# Altium footprint library FootPrintLib_11.PcbLib: 376 footprints (part 7 of 24)
Each footprint in its own frame and in the unit in brackets; x right, y up, seen from the top. Pads: shape width x height; smd on the part's side, far side on the other; paste and mask are expansions set on the pad; w line width, h text height; cw(c..) or ccw(c..) is an arc to the next point about the centre after c.
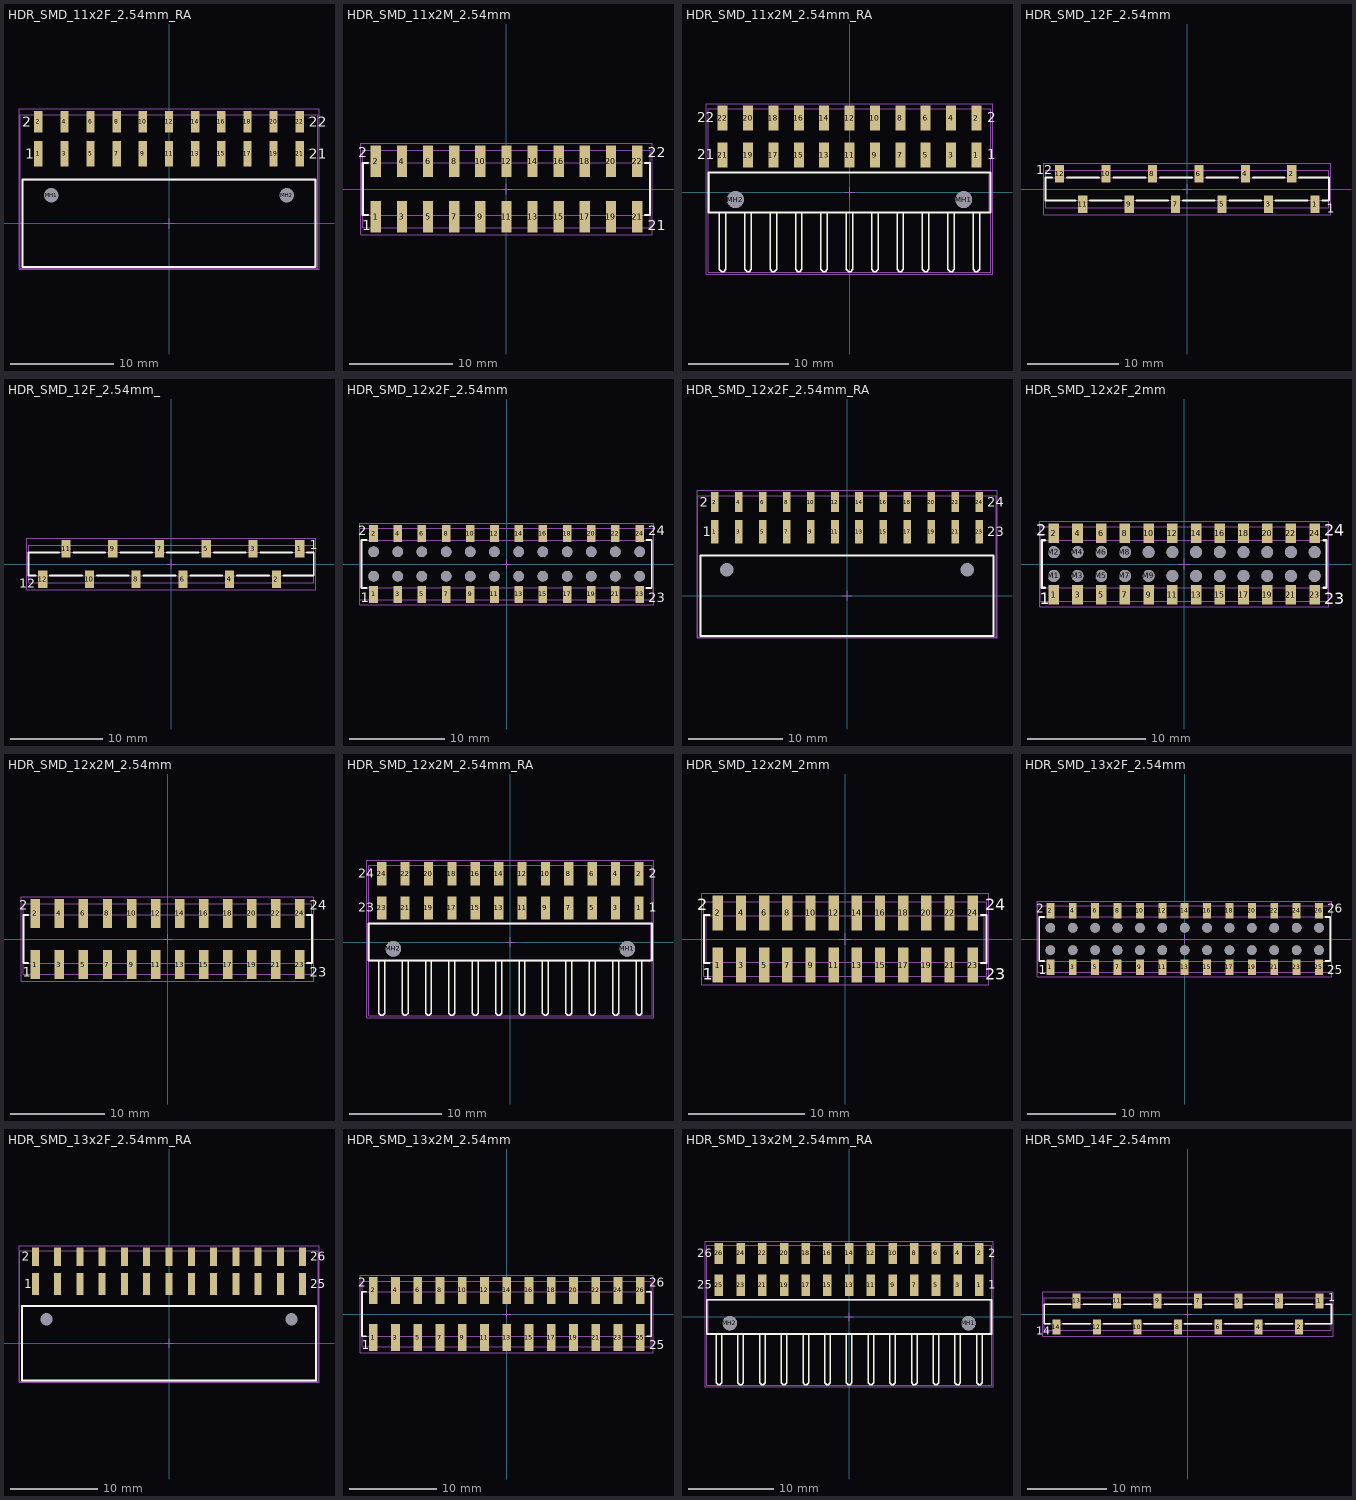
[diagram p6: the footprints below, top view; thin cyan lines are the x and y axes]

## HDR_SMD_11x2F_2.54mm_RA [mm] "Socket Header, Pitch 2.54 mm, SMT, Angled, dual row, 22p"
height 5.2
pads (24):
  rect 0.8x2.5 smd: 1(-12.7,6.76) 3(-10.16,6.76) 5(-7.62,6.76) 7(-5.08,6.76) 9(-2.54,6.76) 11(0,6.76) 13(2.54,6.76) 15(5.08,6.76) 17(7.62,6.76) 19(10.16,6.76) 21(12.7,6.76)
  rect 0.8x2.1 smd: 2(-12.7,9.89) 4(-10.16,9.89) 6(-7.62,9.89) 8(-5.08,9.89) 10(-2.54,9.89) 12(0,9.89) 14(2.54,9.89) 16(5.08,9.89) 18(7.62,9.89) 20(10.16,9.89) 22(12.7,9.89)
  round 1.3 hole 1.4 unplated: MH1(-11.43,2.75) MH2(11.43,2.75)
Top Overlay:
  lines w0.2: -14.22,-4.25 14.22,-4.25 14.22,4.25 -14.22,4.25 -14.22,-4.25
  text "22" at 13.56,9.4 h1
  text "21" at 13.56,6.3 h1
  text "1" at -13.96,6.3 h1
  text "2" at -14.26,9.4 h1
Mechanical 11:
  lines w0.1: -14.22,-4.25 14.22,-4.25 14.22,4.25 -14.22,4.25 -14.22,-4.25
Mechanical 13:
  lines w0.1: -14.47,-4.35 14.47,-4.35 14.47,10.54 -14.47,10.54 -14.47,-4.35
Mechanical 15:
  lines w0.1: -0.5,0 0.5,0 ; 0,-0.5 0,0.5 ; -14.57,-4.45 14.57,-4.45 14.57,11.14 -14.57,11.14 -14.57,-4.45
3D body "610122249221.stp": height 5.03, standoff -1.27, extent -14.22,-4.25 14.22,10.44

## HDR_SMD_11x2M_2.54mm [mm] "Pin Header, pitch 2.54 mm, SMD, Vertical, dual row, 22p"
height 9.6
pads (22):
  rect 1x3.1 smd: 1(-12.7,-2.7) 2(-12.7,2.7) 3(-10.16,-2.7) 4(-10.16,2.7) 5(-7.62,-2.7) 6(-7.62,2.7) 7(-5.08,-2.7) 8(-5.08,2.7) 9(-2.54,-2.7) 10(-2.54,2.7) 11(0,-2.7) 12(0,2.7) 13(2.54,-2.7) 14(2.54,2.7) 15(5.08,-2.7) 16(5.08,2.7) 17(7.62,-2.7) 18(7.62,2.7) 19(10.16,-2.7) 20(10.16,2.7) 21(12.7,-2.7) 22(12.7,2.7)
Top Overlay:
  lines w0.2: -13.48,-2.54 -13.97,-2.54 -13.97,2.54 -13.48,2.54 ; 13.48,-2.54 13.97,-2.54 13.97,2.54 13.48,2.54
  text "22" at 13.73,3.1 h1
  text "21" at 13.73,-4 h1
  text "2" at -14.43,3.1 h1
  text "1" at -14.03,-4 h1
Mechanical 11:
  lines w0.1: -13.97,-2.54 -13.97,2.54 13.97,2.54 13.97,-2.54 -13.97,-2.54
Mechanical 13:
  lines w0.1: -13.97,-3.75 13.97,-3.75 13.97,3.75 -13.97,3.75 -13.97,-3.75
Mechanical 15:
  lines w0.1: -0.5,0 0.5,0 ; 0,-0.5 0,0.5 ; -14.17,-4.45 14.17,-4.45 14.17,4.45 -14.17,4.45 -14.17,-4.45
3D body "61002221121.stp": height 9.62, standoff 0.02, extent -13.97,-3.75 13.97,3.75

## HDR_SMD_11x2M_2.54mm_RA [mm] "Pin Header, pitch 2.54 mm, SMD, Angled, dual row, 22p"
height 5.08
pads (24):
  rect 1x2.5 smd: 1(12.7,3.72) 2(12.7,7.42) 3(10.16,3.72) 4(10.16,7.42) 5(7.62,3.72) 6(7.62,7.42) 7(5.08,3.72) 8(5.08,7.42) 9(2.54,3.72) 10(2.54,7.42) 11(0,3.72) 12(0,7.42) 13(-2.54,3.72) 14(-2.54,7.42) 15(-5.08,3.72) 16(-5.08,7.42) 17(-7.62,3.72) 18(-7.62,7.42) 19(-10.16,3.72) 20(-10.16,7.42) 21(-12.7,3.72) 22(-12.7,7.42)
  round 1.68 hole 1.68 unplated: MH1(11.43,-0.73) MH2(-11.43,-0.73)
Top Overlay:
  lines w0.15: -13.02,-2 -13.02,-7.3 -13.02,-7.58 -13.02,-7.705 -12.8,-7.925 -12.6,-7.925 -12.38,-7.705 -12.38,-7.58 -12.38,-7.3 -12.38,-2 ; -10.48,-2 -10.48,-7.3 -10.48,-7.58 -10.48,-7.705 -10.26,-7.925 -10.06,-7.925 -9.84,-7.705 -9.84,-7.58 -9.84,-7.3 -9.84,-2 ; -7.94,-2 -7.94,-7.3 -7.94,-7.58 -7.94,-7.705 -7.72,-7.925 -7.52,-7.925 -7.3,-7.705 -7.3,-7.58 -7.3,-7.3 -7.3,-2 ; -5.4,-2 -5.4,-7.3 -5.4,-7.58 -5.4,-7.705 -5.18,-7.925 -4.98,-7.925 -4.76,-7.705 -4.76,-7.58 -4.76,-7.3 -4.76,-2 ; -2.86,-2 -2.86,-7.3 -2.86,-7.58 -2.86,-7.705 -2.64,-7.925 -2.44,-7.925 -2.22,-7.705 -2.22,-7.58 -2.22,-7.3 -2.22,-2 ; -0.32,-2 -0.32,-7.3 -0.32,-7.58 -0.32,-7.705 -0.1,-7.925 0.1,-7.925 0.32,-7.705 0.32,-7.58 0.32,-7.3 0.32,-2 ; 2.22,-2 2.22,-7.3 2.22,-7.58 2.22,-7.705 2.44,-7.925 2.64,-7.925 2.86,-7.705 2.86,-7.58 2.86,-7.3 2.86,-2 ; 4.76,-2 4.76,-7.3 4.76,-7.58 4.76,-7.705 4.98,-7.925 5.18,-7.925 5.4,-7.705 5.4,-7.58 5.4,-7.3 5.4,-2 ; 7.3,-2 7.3,-7.3 7.3,-7.58 7.3,-7.705 7.52,-7.925 7.72,-7.925 7.94,-7.705 7.94,-7.58 7.94,-7.3 7.94,-2 ; 9.84,-2 9.84,-7.3 9.84,-7.58 9.84,-7.705 10.06,-7.925 10.26,-7.925 10.48,-7.705 10.48,-7.58 10.48,-7.3 10.48,-2 ; 12.38,-2 12.38,-7.3 12.38,-7.58 12.38,-7.705 12.6,-7.925 12.8,-7.925 13.02,-7.705 13.02,-7.58 13.02,-7.3 13.02,-2
  lines w0.2: -14.12,-2 14.12,-2 14.12,2 -14.12,2 -14.12,-2
  text "22" at -15.27,7 h1
  text "21" at -15.27,3.3 h1
  text "1" at 13.76,3.3 h1
  text "2" at 13.76,7 h1
Mechanical 11:
  lines w0.1: -13.97,-2 13.97,-2 13.97,2 -13.97,2 -13.97,-2
Mechanical 13:
  lines w0.1: -14.12,-8 14.12,-8 14.12,8.36 -14.12,8.36 -14.12,-8
Mechanical 15:
  lines w0.1: -0.5,0 0.5,0 ; 0,-0.5 0,0.5 ; -14.32,-8.2 -14.32,8.87 14.32,8.87 14.32,-8.2 -14.32,-8.2
3D body "610122249121.stp": height 5.1, standoff -1.38, extent -13.97,-8 13.97,8.16

## HDR_SMD_12F_2.54mm [mm] "Socket Header, Pitch 2.54 mm, SMT, Vertical, single row, 12p"
height 7.5
pads (12):
  rect 1x1.91 smd: 1(13.97,-1.645) 2(11.43,1.645) 3(8.89,-1.645) 4(6.35,1.645) 5(3.81,-1.645) 6(1.27,1.645) 7(-1.27,-1.645) 8(-3.81,1.645) 9(-6.35,-1.645) 10(-8.89,1.645) 11(-11.43,-1.645) 12(-13.97,1.645)
Top Overlay:
  lines w0.2: -14.76,1.25 -15.49,1.25 -15.49,-1.25 -12.21,-1.25 ; -13.16,1.25 -9.66,1.25 ; -10.66,-1.25 -7.16,-1.25 ; -8.08,1.25 -4.58,1.25 ; -5.58,-1.25 -2.08,-1.25 ; -3,1.25 0.5,1.25 ; -0.5,-1.25 3,-1.25 ; 2.08,1.25 5.58,1.25 ; 4.58,-1.25 8.08,-1.25 ; 7.16,1.25 10.66,1.25 ; 9.66,-1.25 13.16,-1.25 ; 12.21,1.25 15.49,1.25 15.49,-1.25 14.76,-1.25
  text "1" at 15.26,-2.6 h1
  text "12" at -16.54,1.6 h1
Mechanical 11:
  lines w0.1: -15.49,-1.25 15.49,-1.25 15.49,1.25 -15.49,1.25 -15.49,-1.25
Mechanical 13:
  lines w0.1: -15.49,-2.025 15.49,-2.025 15.49,2.025 -15.49,2.025 -15.49,-2.025
Mechanical 15:
  lines w0.1: -0.5,0 0.5,0 ; 0,-0.5 0,0.5 ; -15.69,-2.8 15.69,-2.8 15.69,2.8 -15.69,2.8 -15.69,-2.8
3D body "61001211921.stp": height 7.5, standoff 0, extent -15.49,-2.025 15.49,2.025

## HDR_SMD_12F_2.54mm_ [mm] "Socket Header, Pitch 2.54 mm, SMT, Vertical, single row, 12p"
height 7.5
pads (12):
  rect 1x1.91 smd: 1(13.97,1.645) 2(11.43,-1.645) 3(8.89,1.645) 4(6.35,-1.645) 5(3.81,1.645) 6(1.27,-1.645) 7(-1.27,1.645) 8(-3.81,-1.645) 9(-6.35,1.645) 10(-8.89,-1.645) 11(-11.43,1.645) 12(-13.97,-1.645)
Top Overlay:
  lines w0.2: -14.76,-1.25 -15.49,-1.25 -15.49,1.25 -12.21,1.25 ; -13.16,-1.25 -9.71,-1.25 ; -10.61,1.25 -7.16,1.25 ; -8.08,-1.25 -4.63,-1.25 ; -5.53,1.25 -2.08,1.25 ; -3,-1.25 0.45,-1.25 ; -0.45,1.25 3,1.25 ; 2.08,-1.25 5.53,-1.25 ; 4.63,1.25 8.08,1.25 ; 7.16,-1.25 10.61,-1.25 ; 9.71,1.25 13.16,1.25 ; 12.21,-1.25 15.49,-1.25 15.49,1.25 14.76,1.25
  text "1" at 15.06,1.6 h1
  text "12" at -16.54,-2.6 h1
Mechanical 11:
  lines w0.1: -15.49,-1.25 15.49,-1.25 15.49,1.25 -15.49,1.25 -15.49,-1.25
Mechanical 13:
  lines w0.1: -15.49,-2.025 -15.49,2.025 15.49,2.025 15.49,-2.025 -15.49,-2.025
Mechanical 15:
  lines w0.1: -0.5,0 0.5,0 ; 0,-0.5 0,0.5 ; -15.69,-2.8 -15.69,2.8 15.69,2.8 15.69,-2.8 -15.69,-2.8
3D body "61001213321.stp": height 7.5, standoff 0, extent -15.49,-2.025 15.49,2.025

## HDR_SMD_12x2F_2.54mm [mm] "Socket Header, Pitch 2.54 mm, SMT, Vertical, dual row, 24p"
height 3.7
pads (48):
  rect 0.9x1.8 smd: 1(-13.97,-3.2) 2(-13.97,3.2) 3(-11.43,-3.2) 4(-11.43,3.2) 5(-8.89,-3.2) 6(-8.89,3.2) 7(-6.35,-3.2) 8(-6.35,3.2) 9(-3.81,-3.2) 10(-3.81,3.2) 11(-1.27,-3.2) 12(-1.27,3.2) 13(1.27,-3.2) 14(1.27,3.2) 15(3.81,-3.2) 16(3.81,3.2) 17(6.35,-3.2) 18(6.35,3.2) 19(8.89,-3.2) 20(8.89,3.2) 21(11.43,-3.2) 22(11.43,3.2) 23(13.97,-3.2) 24(13.97,3.2)
  round 1.1 hole 1.1 unplated: MH1(-13.97,-1.27) MH2(-13.97,1.27) MH3(-11.43,-1.27) MH4(-11.43,1.27) MH5(-8.89,-1.27) MH6(-8.89,1.27) MH7(-6.35,-1.27) MH8(-6.35,1.27) MH9(-3.81,-1.27) MH10(-3.81,1.27) MH11(-1.27,-1.27) MH12(-1.27,1.27) MH13(1.27,-1.27) MH14(1.27,1.27) MH15(3.81,-1.27) MH16(3.81,1.27) MH17(6.35,-1.27) MH18(6.35,1.27) MH19(8.89,-1.27) MH20(8.89,1.27) MH21(11.43,-1.27) MH22(11.43,1.27) MH23(13.97,-1.27) MH24(13.97,1.27)
Top Overlay:
  lines w0.2: -14.7,-2.5 -15.24,-2.5 -15.24,2.5 -14.7,2.5 ; 14.7,-2.5 15.24,-2.5 15.24,2.5 14.7,2.5
  text "23" at 14.9,-4 h1
  text "24" at 14.9,3 h1
  text "1" at -15.3,-4 h1
  text "2" at -15.6,3 h1
Mechanical 11:
  lines w0.1: -15.24,-2.5 -15.24,2.5 15.24,2.5 15.24,-2.5 -15.24,-2.5
Mechanical 13:
  lines w0.1: -15.39,-3.75 -15.39,3.75 15.39,3.75 15.39,-3.75 -15.39,-3.75
Mechanical 15:
  lines w0.1: -0.5,0 0.5,0 ; 0,-0.5 0,0.5 ; -15.44,-4.3 -15.44,4.3 15.44,4.3 15.44,-4.3 -15.44,-4.3
3D body "610024243021.stp": height 3.7, standoff 0, extent -15.24,-3.603 15.24,3.603

## HDR_SMD_12x2F_2.54mm_RA [mm] "Socket Header, Pitch 2.54 mm, SMT, Angled, dual row, 24p"
height 5.2
pads (26):
  rect 0.8x2.5 smd: 1(-13.97,6.76) 3(-11.43,6.76) 5(-8.89,6.76) 7(-6.35,6.76) 9(-3.81,6.76) 11(-1.27,6.76) 13(1.27,6.76) 15(3.81,6.76) 17(6.35,6.76) 19(8.89,6.76) 21(11.43,6.76) 23(13.97,6.76)
  rect 0.8x2.1 smd: 2(-13.97,9.89) 4(-11.43,9.89) 6(-8.89,9.89) 8(-6.35,9.89) 10(-3.81,9.89) 12(-1.27,9.89) 14(1.27,9.89) 16(3.81,9.89) 18(6.35,9.89) 20(8.89,9.89) 22(11.43,9.89) 24(13.97,9.89)
  round 1.3 hole 1.4 unplated: MH1(-12.7,2.75) MH2(12.7,2.75)
Top Overlay:
  lines w0.2: -15.49,-4.25 -15.49,4.25 15.49,4.25 15.49,-4.25 -15.49,-4.25
  text "24" at 14.83,9.4 h1
  text "23" at 14.83,6.3 h1
  text "2" at -15.53,9.4 h1
  text "1" at -15.23,6.3 h1
Mechanical 11:
  lines w0.1: -15.49,-4.25 -15.49,4.25 15.49,4.25 15.49,-4.25 -15.49,-4.25
Mechanical 13:
  lines w0.1: -15.74,-4.35 -15.74,10.54 15.74,10.54 15.74,-4.35 -15.74,-4.35
Mechanical 15:
  lines w0.1: -0.5,0 0.5,0 ; 0,-0.5 0,0.5 ; -15.84,-4.45 -15.84,11.14 15.84,11.14 15.84,-4.45 -15.84,-4.45
3D body "610124249221.stp": height 5.03, standoff -1.27, extent -15.49,-4.25 15.49,10.44

## HDR_SMD_12x2F_2mm [mm] "Socket Header, Pitch 2.00 mm, SMT, Vertical, dual row, 24p"
height 2.35
pads (48):
  rect 0.89x1.65 smd: 1(-11,-2.575) 2(-11,2.575) 3(-9,-2.575) 4(-9,2.575) 5(-7,-2.575) 6(-7,2.575) 7(-5,-2.575) 8(-5,2.575) 9(-3,-2.575) 10(-3,2.575) 11(-1,-2.575) 12(-1,2.575) 13(1,-2.575) 14(1,2.575) 15(3,-2.575) 16(3,2.575) 17(5,-2.575) 18(5,2.575) 19(7,-2.575) 20(7,2.575) 21(9,-2.575) 22(9,2.575) 23(11,-2.575) 24(11,2.575)
  round 1 hole 1 unplated: M1(-11,-1) M2(-11,1) M3(-9,-1) M4(-9,1) M5(-7,-1) M6(-7,1) M7(-5,-1) M8(-5,1) M9(-3,-1) M10(-3,1) M11(-1,-1) M12(-1,1) M13(1,-1) M14(1,1) M15(3,-1) M16(3,1) M17(5,-1) M18(5,1) M19(7,-1) M20(7,1) M21(9,-1) M22(9,1) M23(11,-1) M24(11,1)
Top Overlay:
  lines w0.2: -11.75,-2 -12,-2 -12,2 -11.75,2 ; 11.75,-2 12,-2 12,2 11.75,2
  text "24" at 11.8,2.4 h1
  text "23" at 11.8,-3.4 h1
  text "2" at -12.5,2.4 h1
  text "1" at -12.2,-3.4 h1
Mechanical 11:
  lines w0.1: -12,-2 -12,2 12,2 12,-2 -12,-2
Mechanical 13:
  lines w0.1: -12.15,-3.125 -12.15,3.125 12.15,3.125 12.15,-3.125 -12.15,-3.125
Mechanical 15:
  lines w0.1: -0.5,0 0.5,0 ; 0,-0.5 0,0.5 ; -12.2,-3.6 -12.2,3.6 12.2,3.6 12.2,-3.6 -12.2,-3.6
3D body "62102421821.stp": height 2.1, standoff 0, extent -12,-3 12,3

## HDR_SMD_12x2M_2.54mm [mm] "Pin Header, pitch 2.54 mm, SMD, Vertical, dual row, 24p"
height 9.6
pads (24):
  rect 1x3.1 smd: 1(-13.97,-2.7) 2(-13.97,2.7) 3(-11.43,-2.7) 4(-11.43,2.7) 5(-8.89,-2.7) 6(-8.89,2.7) 7(-6.35,-2.7) 8(-6.35,2.7) 9(-3.81,-2.7) 10(-3.81,2.7) 11(-1.27,-2.7) 12(-1.27,2.7) 13(1.27,-2.7) 14(1.27,2.7) 15(3.81,-2.7) 16(3.81,2.7) 17(6.35,-2.7) 18(6.35,2.7) 19(8.89,-2.7) 20(8.89,2.7) 21(11.43,-2.7) 22(11.43,2.7) 23(13.97,-2.7) 24(13.97,2.7)
Top Overlay:
  lines w0.2: -14.75,-2.54 -15.24,-2.54 -15.24,2.54 -14.75,2.54 ; 14.75,-2.54 15.24,-2.54 15.24,2.54 14.75,2.54
  text "24" at 15,3.1 h1
  text "23" at 15,-4 h1
  text "2" at -15.7,3.1 h1
  text "1" at -15.3,-4 h1
Mechanical 11:
  lines w0.1: -15.24,-2.54 -15.24,2.54 15.24,2.54 15.24,-2.54 -15.24,-2.54
Mechanical 13:
  lines w0.1: -15.24,-3.75 15.24,-3.75 15.24,3.75 -15.24,3.75 -15.24,-3.75
Mechanical 15:
  lines w0.1: -0.5,0 0.5,0 ; 0,-0.5 0,0.5 ; -15.44,-4.45 15.44,-4.45 15.44,4.45 -15.44,4.45 -15.44,-4.45
3D body "61002421121.stp": height 9.62, standoff 0.02, extent -15.24,-3.75 15.24,3.75

## HDR_SMD_12x2M_2.54mm_RA [mm] "Pin Header, pitch 2.54 mm, SMD, Angled, dual row, 24p"
height 5.08
pads (26):
  rect 1x2.5 smd: 1(13.97,3.72) 2(13.97,7.42) 3(11.43,3.72) 4(11.43,7.42) 5(8.89,3.72) 6(8.89,7.42) 7(6.35,3.72) 8(6.35,7.42) 9(3.81,3.72) 10(3.81,7.42) 11(1.27,3.72) 12(1.27,7.42) 13(-1.27,3.72) 14(-1.27,7.42) 15(-3.81,3.72) 16(-3.81,7.42) 17(-6.35,3.72) 18(-6.35,7.42) 19(-8.89,3.72) 20(-8.89,7.42) 21(-11.43,3.72) 22(-11.43,7.42) 23(-13.97,3.72) 24(-13.97,7.42)
  round 1.68 hole 1.68 unplated: MH1(12.7,-0.73) MH2(-12.7,-0.73)
Top Overlay:
  lines w0.15: -14.29,-2 -14.29,-7.3 -14.29,-7.58 -14.29,-7.705 -14.07,-7.925 -13.87,-7.925 -13.65,-7.705 -13.65,-7.58 -13.65,-7.3 -13.65,-2 ; -11.75,-2 -11.75,-7.3 -11.75,-7.58 -11.75,-7.705 -11.53,-7.925 -11.33,-7.925 -11.11,-7.705 -11.11,-7.58 -11.11,-7.3 -11.11,-2 ; -9.21,-2 -9.21,-7.3 -9.21,-7.58 -9.21,-7.705 -8.99,-7.925 -8.79,-7.925 -8.57,-7.705 -8.57,-7.58 -8.57,-7.3 -8.57,-2 ; -6.67,-2 -6.67,-7.3 -6.67,-7.58 -6.67,-7.705 -6.45,-7.925 -6.25,-7.925 -6.03,-7.705 -6.03,-7.58 -6.03,-7.3 -6.03,-2 ; -4.13,-2 -4.13,-7.3 -4.13,-7.58 -4.13,-7.705 -3.91,-7.925 -3.71,-7.925 -3.49,-7.705 -3.49,-7.58 -3.49,-7.3 -3.49,-2 ; -1.59,-2 -1.59,-7.3 -1.59,-7.58 -1.59,-7.705 -1.37,-7.925 -1.17,-7.925 -0.95,-7.705 -0.95,-7.58 -0.95,-7.3 -0.95,-2 ; 0.95,-2 0.95,-7.3 0.95,-7.58 0.95,-7.705 1.17,-7.925 1.37,-7.925 1.59,-7.705 1.59,-7.58 1.59,-7.3 1.59,-2 ; 3.49,-2 3.49,-7.3 3.49,-7.58 3.49,-7.705 3.71,-7.925 3.91,-7.925 4.13,-7.705 4.13,-7.58 4.13,-7.3 4.13,-2 ; 6.03,-2 6.03,-7.3 6.03,-7.58 6.03,-7.705 6.25,-7.925 6.45,-7.925 6.67,-7.705 6.67,-7.58 6.67,-7.3 6.67,-2 ; 8.57,-2 8.57,-7.3 8.57,-7.58 8.57,-7.705 8.79,-7.925 8.99,-7.925 9.21,-7.705 9.21,-7.58 9.21,-7.3 9.21,-2 ; 11.11,-2 11.11,-7.3 11.11,-7.58 11.11,-7.705 11.33,-7.925 11.53,-7.925 11.75,-7.705 11.75,-7.58 11.75,-7.3 11.75,-2 ; 13.65,-2 13.65,-7.3 13.65,-7.58 13.65,-7.705 13.87,-7.925 14.07,-7.925 14.29,-7.705 14.29,-7.58 14.29,-7.3 14.29,-2
  lines w0.2: -15.39,-2 15.39,-2 15.39,2 -15.39,2 -15.39,-2
  text "24" at -16.54,7 h1
  text "23" at -16.54,3.3 h1
  text "1" at 15.03,3.3 h1
  text "2" at 15.03,7 h1
Mechanical 11:
  lines w0.1: -15.24,-2 15.24,-2 15.24,2 -15.24,2 -15.24,-2
Mechanical 13:
  lines w0.1: -15.39,-8 15.39,-8 15.39,8.36 -15.39,8.36 -15.39,-8
Mechanical 15:
  lines w0.1: -0.5,0 0.5,0 ; 0,-0.5 0,0.5 ; -15.59,-8.2 -15.59,8.87 15.59,8.87 15.59,-8.2 -15.59,-8.2
3D body "610124249121.stp": height 5.1, standoff -1.38, extent -15.24,-8 15.24,8.16

## HDR_SMD_12x2M_2mm [mm] "Pin Header, pitch 2.00 mm, SMD, Vertical, dual row, 24p"
height 6.8
pads (24):
  rect 0.89x3 smd: 1(-11,-2.25) 2(-11,2.25) 3(-9,-2.25) 4(-9,2.25) 5(-7,-2.25) 6(-7,2.25) 7(-5,-2.25) 8(-5,2.25) 9(-3,-2.25) 10(-3,2.25) 11(-1,-2.25) 12(-1,2.25) 13(1,-2.25) 14(1,2.25) 15(3,-2.25) 16(3,2.25) 17(5,-2.25) 18(5,2.25) 19(7,-2.25) 20(7,2.25) 21(9,-2.25) 22(9,2.25) 23(11,-2.25) 24(11,2.25)
Top Overlay:
  lines w0.2: -11.75,-2.075 -12.2,-2.075 -12.2,2.075 -11.75,2.075 ; 11.75,-2.075 12.2,-2.075 12.2,2.075 11.75,2.075
  text "23" at 12.1,-3.5 h1
  text "24" at 12.1,2.5 h1
  text "1" at -12.3,-3.5 h1
  text "2" at -12.8,2.5 h1
Mechanical 11:
  lines w0.1: -12,-2 12,-2 12,2 -12,2 -12,-2
Mechanical 13:
  lines w0.1: -12.2,-3.225 -12.2,3.225 12.2,3.225 12.2,-3.225 -12.2,-3.225
Mechanical 15:
  lines w0.1: -0.5,0 0.5,0 ; 0,-0.5 0,0.5 ; -12.4,-3.95 -12.4,3.95 12.4,3.95 12.4,-3.95 -12.4,-3.95
3D body "62132421921.stp": height 6.7, standoff 0, extent -12,-3.1 12,3.1

## HDR_SMD_13x2F_2.54mm [mm] "Socket Header, Pitch 2.54 mm, SMT, Vertical, dual row, 26p"
height 3.7
pads (52):
  rect 0.9x1.8 smd: 1(-15.24,-3.2) 2(-15.24,3.2) 3(-12.7,-3.2) 4(-12.7,3.2) 5(-10.16,-3.2) 6(-10.16,3.2) 7(-7.62,-3.2) 8(-7.62,3.2) 9(-5.08,-3.2) 10(-5.08,3.2) 11(-2.54,-3.2) 12(-2.54,3.2) 13(0,-3.2) 14(0,3.2) 15(2.54,-3.2) 16(2.54,3.2) 17(5.08,-3.2) 18(5.08,3.2) 19(7.62,-3.2) 20(7.62,3.2) 21(10.16,-3.2) 22(10.16,3.2) 23(12.7,-3.2) 24(12.7,3.2) 25(15.24,-3.2) 26(15.24,3.2)
  round 1.1 hole 1.1 unplated: MH1(-15.24,-1.27) MH2(-15.24,1.27) MH3(-12.7,-1.27) MH4(-12.7,1.27) MH5(-10.16,-1.27) MH6(-10.16,1.27) MH7(-7.62,-1.27) MH8(-7.62,1.27) MH9(-5.08,-1.27) MH10(-5.08,1.27) MH11(-2.54,-1.27) MH12(-2.54,1.27) MH13(0,-1.27) MH14(0,1.27) MH15(2.54,-1.27) MH16(2.54,1.27) MH17(5.08,-1.27) MH18(5.08,1.27) MH19(7.62,-1.27) MH20(7.62,1.27) MH21(10.16,-1.27) MH22(10.16,1.27) MH23(12.7,-1.27) MH24(12.7,1.27) MH25(15.24,-1.27) MH26(15.24,1.27)
Top Overlay:
  lines w0.2: -15.97,-2.5 -16.51,-2.5 -16.51,2.5 -15.97,2.5 ; 15.97,-2.5 16.51,-2.5 16.51,2.5 15.97,2.5
  text "25" at 16.17,-4 h1
  text "26" at 16.17,3 h1
  text "1" at -16.57,-4 h1
  text "2" at -16.87,3 h1
Mechanical 11:
  lines w0.1: -16.51,-2.5 -16.51,2.5 16.51,2.5 16.51,-2.5 -16.51,-2.5
Mechanical 13:
  lines w0.1: -16.66,-3.75 -16.66,3.75 16.66,3.75 16.66,-3.75 -16.66,-3.75
Mechanical 15:
  lines w0.1: -0.5,0 0.5,0 ; 0,-0.5 0,0.5 ; -16.71,-4.3 -16.71,4.3 16.71,4.3 16.71,-4.3 -16.71,-4.3
3D body "610026243021.stp": height 3.7, standoff 0, extent -16.51,-3.603 16.51,3.603

## HDR_SMD_13x2F_2.54mm_RA [mm] "Socket Header, Pitch 2.54 mm, SMT, Angled, dual row, 26p"
height 5.2
pads (28):
  rect 0.8x2.5 smd: 1(-15.24,6.76) 3(-12.7,6.76) 5(-10.16,6.76) 7(-7.62,6.76) 9(-5.08,6.76) 11(-2.54,6.76) 13(0,6.76) 15(2.54,6.76) 17(5.08,6.76) 19(7.62,6.76) 21(10.16,6.76) 23(12.7,6.76) 25(15.24,6.76)
  rect 0.8x2.1 smd: 2(-15.24,9.89) 4(-12.7,9.89) 6(-10.16,9.89) 8(-7.62,9.89) 10(-5.08,9.89) 12(-2.54,9.89) 14(0,9.89) 16(2.54,9.89) 18(5.08,9.89) 20(7.62,9.89) 22(10.16,9.89) 24(12.7,9.89) 26(15.24,9.89)
  round 1.3 hole 1.4 unplated: MH1(-13.97,2.75) MH2(13.97,2.75)
Top Overlay:
  lines w0.2: -16.76,-4.25 16.76,-4.25 16.76,4.25 -16.76,4.25 -16.76,-4.25
  text "1" at -16.5,6.3 h1
  text "2" at -16.8,9.4 h1
  text "25" at 16.1,6.3 h1
  text "26" at 16.1,9.4 h1
Mechanical 11:
  lines w0.1: -16.76,-4.25 16.76,-4.25 16.76,4.25 -16.76,4.25 -16.76,-4.25
Mechanical 13:
  lines w0.1: -17.01,-4.35 17.01,-4.35 17.01,10.54 -17.01,10.54 -17.01,-4.35
Mechanical 15:
  lines w0.1: -0.5,0 0.5,0 ; 0,-0.5 0,0.5 ; -17.11,-4.45 17.11,-4.45 17.11,11.14 -17.11,11.14 -17.11,-4.45
3D body "610126249221.stp": height 5.03, standoff -1.27, extent -16.76,-4.25 16.76,10.44

## HDR_SMD_13x2M_2.54mm [mm] "Pin Header, pitch 2.54 mm, SMD, Vertical, dual row, 26p"
height 9.6
pads (26):
  rect 1x3.1 smd: 1(-15.24,-2.7) 2(-15.24,2.7) 3(-12.7,-2.7) 4(-12.7,2.7) 5(-10.16,-2.7) 6(-10.16,2.7) 7(-7.62,-2.7) 8(-7.62,2.7) 9(-5.08,-2.7) 10(-5.08,2.7) 11(-2.54,-2.7) 12(-2.54,2.7) 13(0,-2.7) 14(0,2.7) 15(2.54,-2.7) 16(2.54,2.7) 17(5.08,-2.7) 18(5.08,2.7) 19(7.62,-2.7) 20(7.62,2.7) 21(10.16,-2.7) 22(10.16,2.7) 23(12.7,-2.7) 24(12.7,2.7) 25(15.24,-2.7) 26(15.24,2.7)
Top Overlay:
  lines w0.2: -16.02,-2.54 -16.51,-2.54 -16.51,2.54 -16.02,2.54 ; 16.02,-2.54 16.51,-2.54 16.51,2.54 16.02,2.54
  text "1" at -16.57,-4 h1
  text "2" at -16.97,3.1 h1
  text "25" at 16.27,-4 h1
  text "26" at 16.27,3.1 h1
Mechanical 11:
  lines w0.1: -16.51,-2.54 16.51,-2.54 16.51,2.54 -16.51,2.54 -16.51,-2.54
Mechanical 13:
  lines w0.1: -16.51,-3.75 -16.51,3.75 16.51,3.75 16.51,-3.75 -16.51,-3.75
Mechanical 15:
  lines w0.1: -0.5,0 0.5,0 ; 0,-0.5 0,0.5 ; -16.71,-4.45 -16.71,4.45 16.71,4.45 16.71,-4.45 -16.71,-4.45
3D body "61002621121.stp": height 9.62, standoff 0.02, extent -16.51,-3.75 16.51,3.75

## HDR_SMD_13x2M_2.54mm_RA [mm] "Pin Header, pitch 2.54 mm, SMD, Angled, dual row, 26p"
height 5.08
pads (28):
  rect 1x2.5 smd: 1(15.24,3.72) 2(15.24,7.42) 3(12.7,3.72) 4(12.7,7.42) 5(10.16,3.72) 6(10.16,7.42) 7(7.62,3.72) 8(7.62,7.42) 9(5.08,3.72) 10(5.08,7.42) 11(2.54,3.72) 12(2.54,7.42) 13(0,3.72) 14(0,7.42) 15(-2.54,3.72) 16(-2.54,7.42) 17(-5.08,3.72) 18(-5.08,7.42) 19(-7.62,3.72) 20(-7.62,7.42) 21(-10.16,3.72) 22(-10.16,7.42) 23(-12.7,3.72) 24(-12.7,7.42) 25(-15.24,3.72) 26(-15.24,7.42)
  round 1.68 hole 1.68 unplated: MH1(13.97,-0.73) MH2(-13.97,-0.73)
Top Overlay:
  lines w0.15: -15.56,-2 -15.56,-7.3 -15.56,-7.58 -15.56,-7.705 -15.34,-7.925 -15.14,-7.925 -14.92,-7.705 -14.92,-7.58 -14.92,-7.3 -14.92,-2 ; -13.02,-2 -13.02,-7.3 -13.02,-7.58 -13.02,-7.705 -12.8,-7.925 -12.6,-7.925 -12.38,-7.705 -12.38,-7.58 -12.38,-7.3 -12.38,-2 ; -10.48,-2 -10.48,-7.3 -10.48,-7.58 -10.48,-7.705 -10.26,-7.925 -10.06,-7.925 -9.84,-7.705 -9.84,-7.58 -9.84,-7.3 -9.84,-2 ; -7.94,-2 -7.94,-7.3 -7.94,-7.58 -7.94,-7.705 -7.72,-7.925 -7.52,-7.925 -7.3,-7.705 -7.3,-7.58 -7.3,-7.3 -7.3,-2 ; -5.4,-2 -5.4,-7.3 -5.4,-7.58 -5.4,-7.705 -5.18,-7.925 -4.98,-7.925 -4.76,-7.705 -4.76,-7.58 -4.76,-7.3 -4.76,-2 ; -2.86,-2 -2.86,-7.3 -2.86,-7.58 -2.86,-7.705 -2.64,-7.925 -2.44,-7.925 -2.22,-7.705 -2.22,-7.58 -2.22,-7.3 -2.22,-2 ; -0.32,-2 -0.32,-7.3 -0.32,-7.58 -0.32,-7.705 -0.1,-7.925 0.1,-7.925 0.32,-7.705 0.32,-7.58 0.32,-7.3 0.32,-2 ; 2.22,-2 2.22,-7.3 2.22,-7.58 2.22,-7.705 2.44,-7.925 2.64,-7.925 2.86,-7.705 2.86,-7.58 2.86,-7.3 2.86,-2 ; 4.76,-2 4.76,-7.3 4.76,-7.58 4.76,-7.705 4.98,-7.925 5.18,-7.925 5.4,-7.705 5.4,-7.58 5.4,-7.3 5.4,-2 ; 7.3,-2 7.3,-7.3 7.3,-7.58 7.3,-7.705 7.52,-7.925 7.72,-7.925 7.94,-7.705 7.94,-7.58 7.94,-7.3 7.94,-2 ; 9.84,-2 9.84,-7.3 9.84,-7.58 9.84,-7.705 10.06,-7.925 10.26,-7.925 10.48,-7.705 10.48,-7.58 10.48,-7.3 10.48,-2 ; 12.38,-2 12.38,-7.3 12.38,-7.58 12.38,-7.705 12.6,-7.925 12.8,-7.925 13.02,-7.705 13.02,-7.58 13.02,-7.3 13.02,-2 ; 14.92,-2 14.92,-7.3 14.92,-7.58 14.92,-7.705 15.14,-7.925 15.34,-7.925 15.56,-7.705 15.56,-7.58 15.56,-7.3 15.56,-2
  lines w0.2: -16.66,-2 16.66,-2 16.66,2 -16.66,2 -16.66,-2
  text "25" at -17.81,3.3 h1
  text "26" at -17.81,7 h1
  text "1" at 16.3,3.3 h1
  text "2" at 16.3,7 h1
Mechanical 11:
  lines w0.1: -16.51,-2 16.51,-2 16.51,2 -16.51,2 -16.51,-2
Mechanical 13:
  lines w0.1: -16.66,-8 16.66,-8 16.66,8.36 -16.66,8.36 -16.66,-8
Mechanical 15:
  lines w0.1: -0.5,0 0.5,0 ; 0,-0.5 0,0.5 ; -16.86,-8.2 -16.86,8.87 16.86,8.87 16.86,-8.2 -16.86,-8.2
3D body "610126249121.stp": height 5.1, standoff -1.38, extent -16.51,-8 16.51,8.16

## HDR_SMD_14F_2.54mm [mm] "Socket Header, Pitch 2.54 mm, SMT, Vertical, single row, 14p"
height 7.5
pads (14):
  rect 1x1.91 smd: 1(16.51,1.645) 2(13.97,-1.645) 3(11.43,1.645) 4(8.89,-1.645) 5(6.35,1.645) 6(3.81,-1.645) 7(1.27,1.645) 8(-1.27,-1.645) 9(-3.81,1.645) 10(-6.35,-1.645) 11(-8.89,1.645) 12(-11.43,-1.645) 13(-13.97,1.645) 14(-16.51,-1.645)
Top Overlay:
  lines w0.2: -17.3,-1.25 -18.03,-1.25 -18.03,1.25 -14.75,1.25 ; -15.7,-1.25 -12.25,-1.25 ; -13.15,1.25 -9.7,1.25 ; -10.62,-1.25 -7.17,-1.25 ; -8.07,1.25 -4.62,1.25 ; -5.54,-1.25 -2.09,-1.25 ; -2.99,1.25 0.46,1.25 ; -0.46,-1.25 2.99,-1.25 ; 2.09,1.25 5.54,1.25 ; 4.62,-1.25 8.07,-1.25 ; 7.17,1.25 10.62,1.25 ; 9.7,-1.25 13.15,-1.25 ; 12.25,1.25 15.7,1.25 ; 14.75,-1.25 18.03,-1.25 18.03,1.25 17.3,1.25
  text "1" at 17.6,1.6 h1
  text "14" at -19.08,-2.6 h1
Mechanical 11:
  lines w0.1: -18.03,-1.25 18.03,-1.25 18.03,1.25 -18.03,1.25 -18.03,-1.25
Mechanical 13:
  lines w0.1: -18.03,-2.025 -18.03,2.025 18.03,2.025 18.03,-2.025 -18.03,-2.025
Mechanical 15:
  lines w0.1: -0.5,0 0.5,0 ; 0,-0.5 0,0.5 ; -18.23,-2.8 -18.23,2.8 18.23,2.8 18.23,-2.8 -18.23,-2.8
3D body "61001413321.stp": height 7.5, standoff 0, extent -18.03,-2.025 18.03,2.025